# EAGLE library part MC9S12C64VFAE (library madhu)
Freescale 16-bit microcontroller
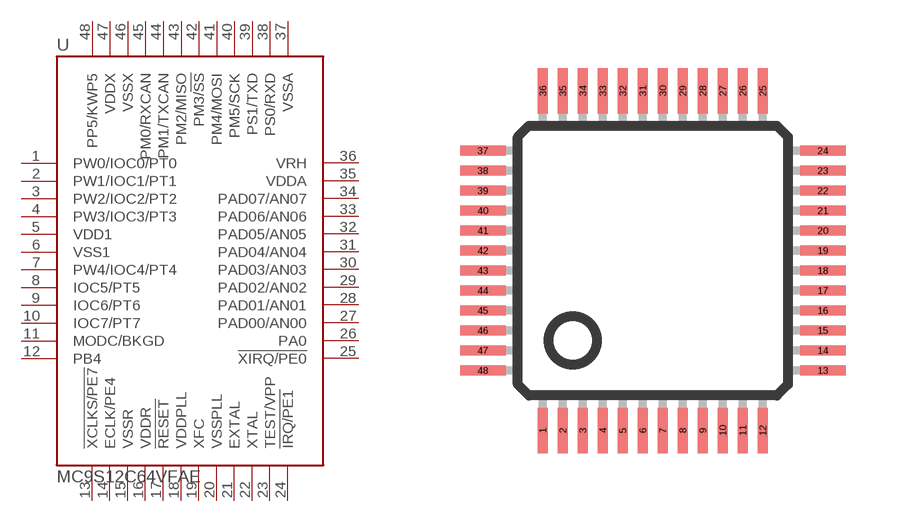
[diagram p5: symbol with the pads of LQFP-48; footprint LQFP-48]

Designator prefix U

## MC9S12C64VFAE  [LQFP-48]
1  PW0/IOC0/PT0
2  PW1/IOC1/PT1
3  PW2/IOC2/PT2
4  PW3/IOC3/PT3
5  VDD1
6  VSS1
7  PW4/IOC4/PT4
8  IOC5/PT5
9  IOC6/PT6
10  IOC7/PT7
11  MODC/BKGD
12  PB4
13  !XCLKS/PE7
14  ECLK/PE4
15  VSSR
16  VDDR
17  !RESET
18  VDDPLL
19  XFC
20  VSSPLL
21  EXTAL
22  XTAL
23  TEST/VPP
24  !IRQ/PE1
25  !XIRQ/PE0
26  PA0
27  PAD00/AN00
28  PAD01/AN01
29  PAD02/AN02
30  PAD03/AN03
31  PAD04/AN04
32  PAD05/AN05
33  PAD06/AN06
34  PAD07/AN07
35  VDDA
36  VRH
37  VSSA
38  PS0/RXD
39  PS1/TXD
40  PM5/SCK
41  PM4/MOSI
42  PM3/!SS
43  PM2/MISO
44  PM1/TXCAN
45  PM0/RXCAN
46  VSSX
47  VDDX
48  PP5/KWP5

## Footprint LQFP-48 (pad centres in mm)
48-pin LQFP
smd 0.254 x 1.143: 1 -2.75,-4.25; 2 -2.25,-4.25; 3 -1.75,-4.25; 4 -1.25,-4.25; 5 -0.75,-4.25; 6 -0.25,-4.25; 7 0.25,-4.25; 8 0.75,-4.25; 9 1.25,-4.25; 10 1.75,-4.25; 11 2.25,-4.25; 12 2.75,-4.25; 25 2.75,4.25; 26 2.25,4.25; 27 1.75,4.25; 28 1.25,4.25; 29 0.75,4.25; 30 0.25,4.25; 31 -0.25,4.25; 32 -0.75,4.25; 33 -1.25,4.25; 34 -1.75,4.25; 35 -2.25,4.25; 36 -2.75,4.25
smd 1.143 x 0.254: 13 4.25,-2.75; 14 4.25,-2.25; 15 4.25,-1.75; 16 4.25,-1.25; 17 4.25,-0.75; 18 4.25,-0.25; 19 4.25,0.25; 20 4.25,0.75; 21 4.25,1.25; 22 4.25,1.75; 23 4.25,2.25; 24 4.25,2.75; 37 -4.25,2.75; 38 -4.25,2.25; 39 -4.25,1.75; 40 -4.25,1.25; 41 -4.25,0.75; 42 -4.25,0.25; 43 -4.25,-0.25; 44 -4.25,-0.75; 45 -4.25,-1.25; 46 -4.25,-1.75; 47 -4.25,-2.25; 48 -4.25,-2.75